# Altium schematic symbol library MY_LIB_Special_IEC.SchLib: 2 symbols
Pins are listed as number, name and electrical type; pins without a type are passive.

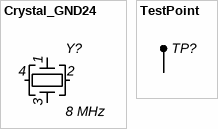
[diagram p0: symbols Crystal_GND24 to TestPoint]

## Crystal_GND24
designator Y?, comment 8 MHz
Four-pin quartz crystal resonator with ground terminals 2 and 4
pins: 1 XTAL1, 2 GND, 3 XTAL2, 4 GND

## TestPoint
designator TP?  (value not drawn)  (no BOM)
Test point indicator; Standard: IEC 60617 S00212
pins: 1 TP